# Altium footprint library Passives.PcbLib: 33 footprints (part 2 of 3)
Each footprint in its own frame and in the unit in brackets; x right, y up, seen from the top. Pads: shape width x height; smd on the part's side, far side on the other; paste and mask are expansions set on the pad; w line width, h text height; cw(c..) or ccw(c..) is an arc to the next point about the centre after c.
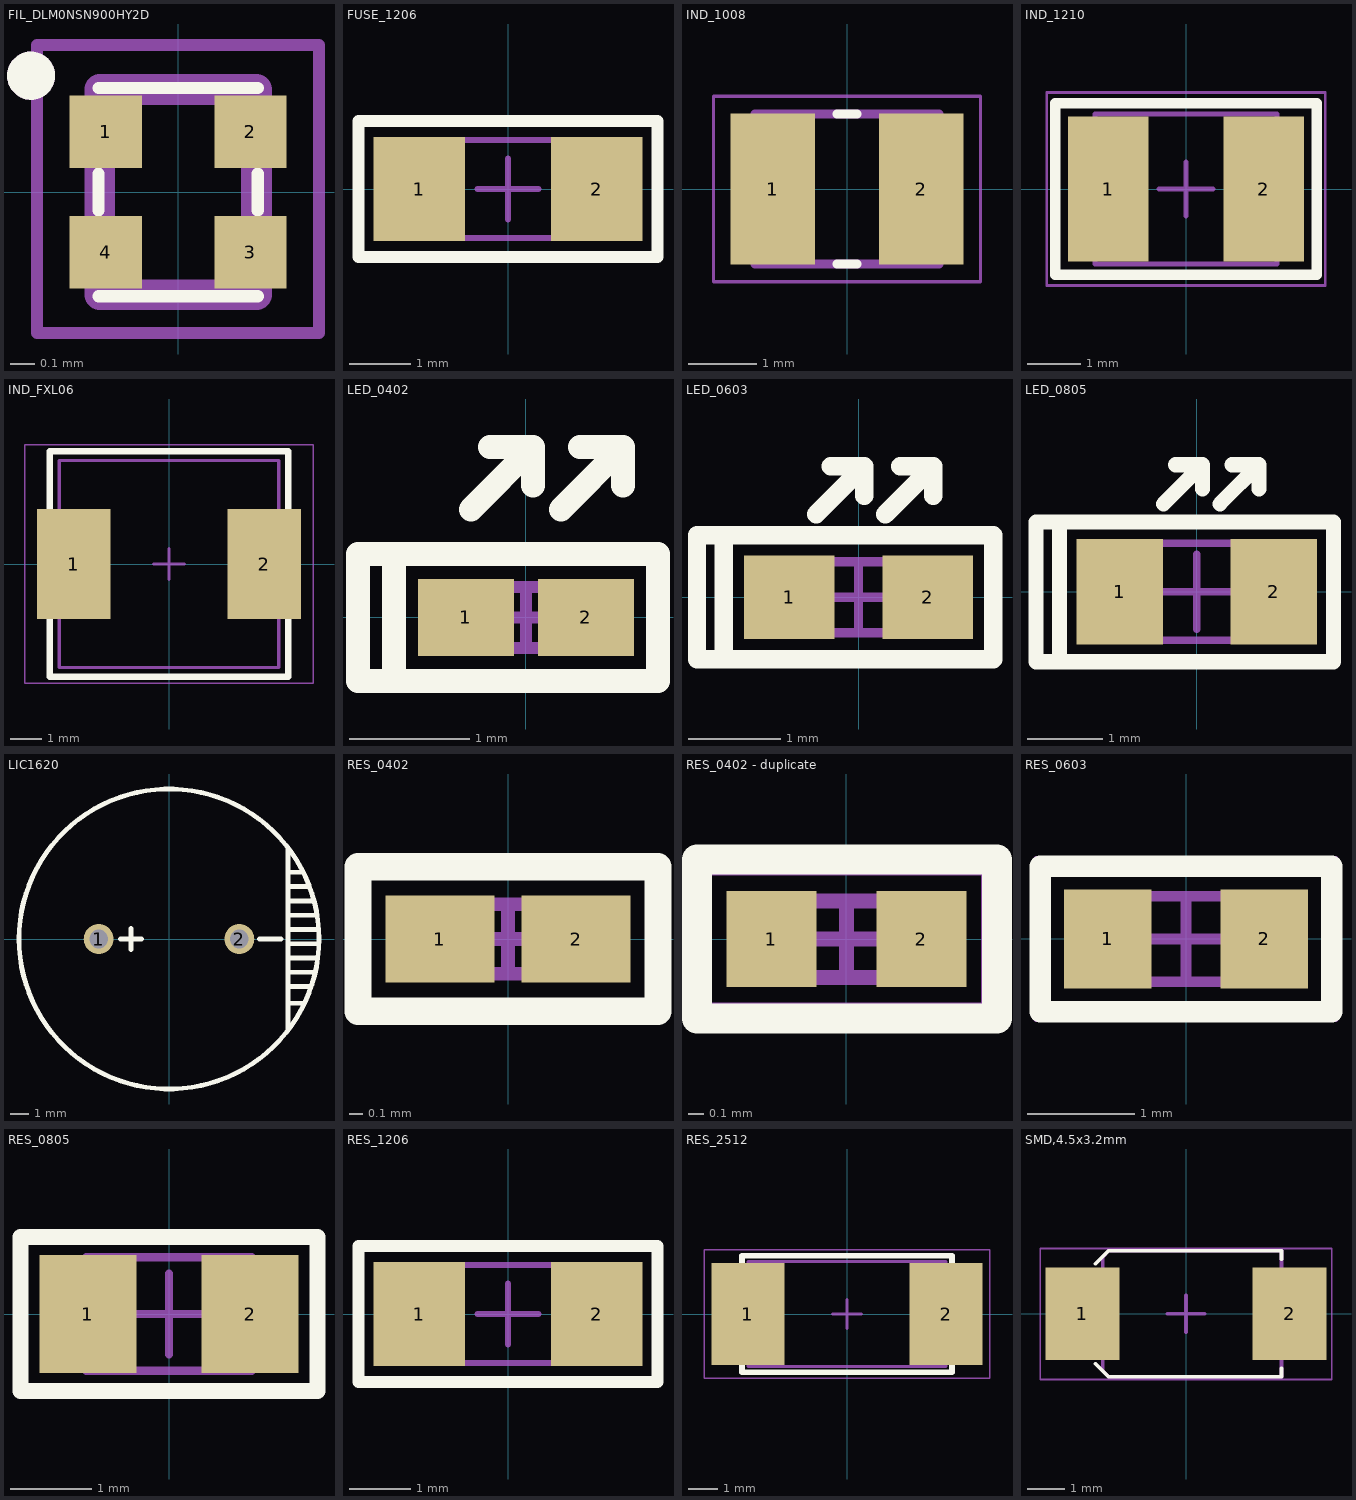
[diagram p1: the footprints below, top view; thin cyan lines are the x and y axes]

## FIL_DLM0NSN900HY2D [mm]
pads (4):
  rect 0.3x0.3 smd mask+0: 1(-0.3,0.25) 2(0.3,0.25) 3(0.3,-0.25) 4(-0.3,-0.25)
Top Overlay:
  circle w0.1: c-0.61,0.483 r0.05
  lines w0.051: -0.33,-0.432 0.33,-0.432 ; -0.33,-0.076 -0.33,0.076 ; -0.33,0.432 0.33,0.432 ; 0.33,-0.076 0.33,0.076
Top Solder:
  region: -0.15,0.1 -0.45,0.1 -0.45,0.4 -0.15,0.4
  region: 0.45,0.1 0.15,0.1 0.15,0.4 0.45,0.4
  region: -0.15,-0.4 -0.45,-0.4 -0.45,-0.1 -0.15,-0.1
  region: 0.45,-0.4 0.15,-0.4 0.15,-0.1 0.45,-0.1
Mechanical 13:
  circle w0.1: c-0.61,0.483 r0.05
  lines w0.127: -0.325,-0.425 -0.325,0.425 0.325,0.425 0.325,-0.425 -0.325,-0.425
Mechanical 15:
  lines w0.05: -0.584,-0.584 0.584,-0.584 0.584,0.61 -0.584,0.61 -0.584,-0.584

## FUSE_1206 [mm]
pads (2):
  rect 1.5x1.7 smd: 1(-1.45,0) 2(1.45,0)
Top Overlay:
  lines w0.2: -2.44,-1.11 2.44,-1.11 2.44,1.11 -2.44,1.11 -2.44,-1.11
Mechanical 13:
  lines w0.1: -1.53,-0.8 -1.53,0.8 1.53,0.8 1.53,-0.8 -1.53,-0.8
Mechanical 15:
  lines w0.05: -2.45,-1.1 -2.45,1.1 2.45,1.1 2.45,-1.1 -2.45,-1.1
  lines w0.1: -0.5,0 0.5,0 ; 0,-0.5 0,0.5
3D body: height 0.8, standoff 0, extent -0.88,-0.8 0.88,0.8
3D body: height 0.8, standoff 0, extent -1.53,-0.8 -0.88,0.8
3D body: height 0.8, standoff 0, extent 0.88,-0.8 1.53,0.8

## IND_1008 [mm]
pads (2):
  rect 1.24x2.22 smd: 1(-1.09,0) 2(1.09,0)
Top Overlay:
  lines w0.127: -0.15,-1.1 0.15,-1.1 ; -0.15,1.1 0.15,1.1
Mechanical 13:
  lines w0.127: -1.35,-1.1 -1.35,1.1 1.35,1.1 1.35,-1.1 -1.35,-1.1
Mechanical 15:
  lines w0.05: -1.958,-1.358 -1.958,1.358 1.958,1.358 1.958,-1.358 -1.958,-1.358
3D body "step_temp.STEP": height 1.2, standoff 0, extent -1.25,-1 1.25,1

## IND_1210 [mm]
height 0.8
pads (2):
  rect 1.5x2.7 smd: 1(-1.45,0) 2(1.45,0)
Top Overlay:
  lines w0.2: -2.44,-1.6 -2.44,1.6 2.44,1.6 2.44,-1.6 -2.44,-1.6
Mechanical 13:
  lines w0.1: -1.7,-1.4 1.7,-1.4 1.7,1.4 -1.7,1.4 -1.7,-1.4
Mechanical 15:
  lines w0.05: -2.6,-1.8 2.6,-1.8 2.6,1.8 -2.6,1.8 -2.6,-1.8
  lines w0.1: -0.5,0 0.5,0 ; 0,-0.5 0,0.5
3D body: height 2.5, standoff 0, extent 0.88,-1.4 1.7,1.4
3D body: height 2.5, standoff 0, extent -1.7,-1.4 -0.88,1.4
3D body: height 2.48, standoff 0.02, extent -0.88,-1.38 0.88,1.38

## IND_FXL06 [mm] "Precision Wire Wound Inductor, 2-Leads, Body 4,50x4,00mm, IPC Medium Density"
height 3.3
pads (2):
  rect 2.35x3.5 smd: 1(-3.035,0) 2(3.035,0)
Top Overlay:
  lines w0.2: -3.8,-3.6 3.8,-3.6 3.8,3.6 -3.8,3.6 -3.8,-3.6
Mechanical 13:
  lines w0.1: -3.5,-3.3 -3.5,3.3 3.5,3.3 3.5,-3.3 -3.5,-3.3
Mechanical 15:
  lines w0.05: -4.6,-3.8 -4.6,3.8 4.6,3.8 4.6,-3.8 -4.6,-3.8
  lines w0.1: -0.5,0 0.5,0 ; 0,-0.5 0,0.5
3D body: height 2.8, standoff 0, extent -3.5,-3.3 3.5,3.3

## LED_0402 [mm] "Chip Capacitor, 2-Leads, Body 1,53x0,77mm, IPC Medium Density"
height 0.7
pads (2):
  rect 0.8x0.64 smd: 1(-0.5,0) 2(0.5,0)
Top Overlay:
  lines w0.2: -0.46,0.9 0.06,1.42 ; -0.3,1.42 0.06,1.42 ; 0.06,1.1 0.06,1.42 ; 0.29,0.9 0.81,1.42 ; 0.45,1.42 0.81,1.42 ; 0.81,1.1 0.81,1.42 ; -1.1,-0.53 -1.4,-0.53 -1.4,0.53 -1.1,0.53 ; -1.1,-0.53 1.1,-0.53 1.1,0.53 -1.1,0.53 ; -1.1,-0.53 -1.1,0.53
Mechanical 13:
  lines w0.1: -0.55,-0.255 -0.55,0.255 0.55,0.255 0.55,-0.255 -0.55,-0.255
Mechanical 15:
  lines w0.05: -1.05,-0.5 -1.05,0.5 1.05,0.5 1.05,-0.5 -1.05,-0.5
  lines w0.1: -0.255,0 0.255,0 ; 0,-0.255 0,0.255
3D body: height 0.5, standoff 0, extent -0.3,-0.255 0.3,0.255
3D body: height 0.5, standoff 0, extent -0.55,-0.255 -0.3,0.255
3D body: height 0.5, standoff 0, extent 0.3,-0.255 0.55,0.255

## LED_0603 [mm] "Chip Capacitor, 2-Leads, Body 1,53x0,77mm, IPC Medium Density"
height 0.7
pads (2):
  rect 0.98x0.9 smd: 1(-0.75,0) 2(0.75,0)
Top Overlay:
  lines w0.2: -0.46,0.9 0.06,1.42 ; -0.3,1.42 0.06,1.42 ; 0.06,1.1 0.06,1.42 ; 0.29,0.9 0.81,1.42 ; 0.45,1.42 0.81,1.42 ; 0.81,1.1 0.81,1.42 ; -1.46,-0.67 -1.75,-0.67 -1.75,0.67 -1.46,0.67 ; -1.46,-0.67 -1.46,0.67 ; -1.46,-0.67 1.46,-0.67 1.46,0.67 -1.46,0.67
Mechanical 13:
  lines w0.1: -0.775,-0.385 -0.775,0.385 0.775,0.385 0.775,-0.385 -0.775,-0.385
Mechanical 15:
  lines w0.05: -1.5,-0.7 -1.5,0.7 1.5,0.7 1.5,-0.7 -1.5,-0.7
  lines w0.1: -0.385,0 0.385,0 ; 0,-0.385 0,0.385
3D body: height 0.7, standoff 0, extent -0.345,-0.385 0.345,0.385
3D body: height 0.7, standoff 0, extent -0.775,-0.385 -0.345,0.385
3D body: height 0.7, standoff 0, extent 0.345,-0.385 0.775,0.385

## LED_0805 [mm]
pads (2):
  rect 1.15x1.4 smd: 1(-1.025,0) 2(1.025,0)
Top Overlay:
  lines w0.2: -1.82,-0.93 -2.14,-0.93 -2.14,0.93 -1.82,0.93 ; -0.445,1.17 0.075,1.69 ; -0.285,1.69 0.075,1.69 ; 0.075,1.37 0.075,1.69 ; 0.305,1.17 0.825,1.69 ; 0.465,1.69 0.825,1.69 ; 0.825,1.37 0.825,1.69 ; -1.825,-0.93 -1.825,0.93 1.815,0.93 1.815,-0.93 -1.825,-0.93
Mechanical 13:
  lines w0.1: -1.035,-0.645 1.035,-0.645 1.035,0.645 -1.035,0.645 -1.035,-0.645
Mechanical 15:
  lines w0.05: -1.85,-0.95 1.85,-0.95 1.85,0.95 -1.85,0.95 -1.85,-0.95
  lines w0.1: -0.5,0 0.5,0 ; 0,-0.5 0,0.5
3D body: height 1.4, standoff 0, extent 0.535,-0.645 1.035,0.645
3D body: height 1.4, standoff 0, extent -1.035,-0.645 -0.535,0.645
3D body: height 1.4, standoff 0, extent -0.535,-0.645 0.535,0.645

## LIC1620 [mm]
pads (2):
  round 1.6 hole 1: 1(-3.75,0) 2(3.75,0)
Top Overlay:
  circle w0.254: c0,0 r8
  lines w0.254: -2.603,0 -1.46,0 ; -2.032,-0.572 -2.032,0.572 ; 4.826,0 5.969,0 ; 6.35,-4.826 6.35,4.826 ; 6.35,-3.429 7.112,-3.429 ; 6.35,-2.54 7.493,-2.54 ; 6.35,-1.778 7.747,-1.778 ; 6.35,-1.016 7.874,-1.016 ; 6.35,-0.254 7.874,-0.254 ; 6.35,0.508 7.874,0.508 ; 6.35,1.27 7.874,1.27 ; 6.35,2.032 7.62,2.032 ; 6.35,2.794 7.366,2.794 ; 6.35,3.556 7.112,3.556

## RES_0402 [mm]
pads (2):
  rect 0.8x0.64 smd: 1(-0.5,0) 2(0.5,0)
Top Overlay:
  lines w0.2: -1.1,-0.53 1.1,-0.53 1.1,0.53 -1.1,0.53 -1.1,-0.53
Mechanical 13:
  lines w0.1: -0.55,-0.255 -0.55,0.255 0.55,0.255 0.55,-0.255 -0.55,-0.255
Mechanical 15:
  lines w0.05: -1.05,-0.5 -1.05,0.5 1.05,0.5 1.05,-0.5 -1.05,-0.5
  lines w0.1: -0.255,0 0.255,0 ; 0,-0.255 0,0.255
3D body: height 0.5, standoff 0, extent -0.3,-0.255 0.3,0.255
3D body: height 0.5, standoff 0, extent -0.55,-0.255 -0.3,0.255
3D body: height 0.5, standoff 0, extent 0.3,-0.255 0.55,0.255

## RES_0402 - duplicate [mm]
pads (2):
  rect 0.6x0.64 smd: 1(-0.5,0) 2(0.5,0)
Top Overlay:
  lines w0.2: -0.996,-0.53 1.004,-0.53 1.004,0.53 -0.996,0.53 -0.996,-0.53
Mechanical 13:
  lines w0.1: -0.55,-0.255 -0.55,0.255 0.55,0.255 0.55,-0.255 -0.55,-0.255
Mechanical 15:
  lines w0.05: -0.922,-0.449 -0.922,0.447 0.921,0.447 0.921,-0.449 -0.922,-0.449
  lines w0.1: -0.255,0 0.255,0 ; 0,-0.255 0,0.255
3D body: height 0.5, standoff 0, extent -0.3,-0.255 0.3,0.255
3D body: height 0.5, standoff 0, extent -0.55,-0.255 -0.3,0.255
3D body: height 0.5, standoff 0, extent 0.3,-0.255 0.55,0.255

## RES_0603 [mm]
pads (2):
  rect 0.82x0.92 smd: 1(-0.73,0) 2(0.73,0)
Top Overlay:
  lines w0.2: -1.36,-0.68 -1.36,0.68 1.36,0.68 1.36,-0.68 -1.36,-0.68
Mechanical 13:
  lines w0.1: -0.8,-0.4 -0.8,0.4 0.8,0.4 0.8,-0.4 -0.8,-0.4
Mechanical 15:
  lines w0.05: -1.4,-0.75 -1.4,0.75 1.4,0.75 1.4,-0.75 -1.4,-0.75
  lines w0.1: -0.4,0 0.4,0 ; 0,-0.4 0,0.4
3D body: height 0.7, standoff 0, extent -0.45,-0.4 0.45,0.4
3D body: height 0.7, standoff 0, extent -0.8,-0.4 -0.45,0.4
3D body: height 0.7, standoff 0, extent 0.45,-0.4 0.8,0.4

## RES_0805 [mm]
pads (2):
  rect 1.2x1.45 smd: 1(-1,0) 2(1,0)
Top Overlay:
  lines w0.2: -1.83,-0.95 1.83,-0.95 1.83,0.95 -1.83,0.95 -1.83,-0.95
Mechanical 13:
  lines w0.1: -1.02,-0.7 -1.02,0.7 1.02,0.7 1.02,-0.7 -1.02,-0.7
Mechanical 15:
  lines w0.05: -1.85,-1 -1.85,1 1.85,1 1.85,-1 -1.85,-1
  lines w0.1: -0.5,0 0.5,0 ; 0,-0.5 0,0.5
3D body: height 1.3, standoff 0, extent -0.47,-0.7 0.47,0.7
3D body: height 1.3, standoff 0, extent -1.02,-0.7 -0.47,0.7
3D body: height 1.3, standoff 0, extent 0.47,-0.7 1.02,0.7

## RES_1206 [mm]
pads (2):
  rect 1.5x1.7 smd: 1(-1.45,0) 2(1.45,0)
Top Overlay:
  lines w0.2: -2.44,-1.11 -2.44,1.11 2.44,1.11 2.44,-1.11 -2.44,-1.11
Mechanical 13:
  lines w0.1: -1.53,-0.8 1.53,-0.8 1.53,0.8 -1.53,0.8 -1.53,-0.8
Mechanical 15:
  lines w0.05: -2.45,-1.1 2.45,-1.1 2.45,1.1 -2.45,1.1 -2.45,-1.1
  lines w0.1: -0.5,0 0.5,0 ; 0,-0.5 0,0.5
3D body: height 0.8, standoff 0, extent 0.88,-0.8 1.53,0.8
3D body: height 0.8, standoff 0, extent -1.53,-0.8 -0.88,0.8
3D body: height 0.8, standoff 0, extent -0.88,-0.8 0.88,0.8

## RES_2512 [mm]
pads (2):
  rect 2.5x3.5 smd: 1(-3.4,0) 2(3.4,0)
Top Overlay:
  lines w0.2: -3.6,-2 -3.6,2 3.6,2 3.6,-2 -3.6,-2
Mechanical 13:
  lines w0.1: -3.4,-1.8 3.4,-1.8 3.4,1.8 -3.4,1.8 -3.4,-1.8
Mechanical 15:
  lines w0.05: -4.9,-2.2 -4.9,2.2 4.9,2.2 4.9,-2.2 -4.9,-2.2
  lines w0.1: -0.5,0 0.5,0 ; 0,-0.5 0,0.5
3D body: height 0.8, standoff 0, extent 2.5,-1.8 3.4,1.8
3D body: height 0.8, standoff 0, extent -3.4,-1.8 -2.5,1.8
3D body: height 0.8, standoff 0, extent -2.5,-1.8 2.5,1.8

## SMD,4.5x3.2mm [mm] "300@1MHz 5pF~20pF 0%~+50% 100V SMD,4.5x3.2mm Trimmers, Variable Capacitors RoHS"
height 2
pads (2):
  rect 2x2.5 smd: 1(-2.8,0) 2(2.8,0)
Top Overlay:
  lines w0.1: -2.441,-1.349 -2.09,-1.7 2.25,-1.7 2.58,-1.7 2.58,-1.47 ; -2.441,1.349 -2.09,1.7 2.23,1.7 2.58,1.7 2.58,1.48
Mechanical 13:
  lines w0.1: -2.25,-1.538 -2.25,1.538 -2.088,1.7 2.58,1.7 2.58,-1.7 -2.088,-1.7 -2.25,-1.538
Mechanical 15:
  lines w0.05: -3.937,-1.77 3.937,-1.77 3.937,1.76 -3.937,1.76 -3.937,-1.77
  lines w0.1: -0.5,0 0.5,0 ; 0,-0.5 0,0.5
3D body: height 2, standoff 0, extent -1.35,-1.35 1.339,1.345
3D body: height 0.67, standoff 0, extent -2.25,-1.7 2.59,1.7